# EAGLE library part BUFFER-CASTELLATION (library pixel)
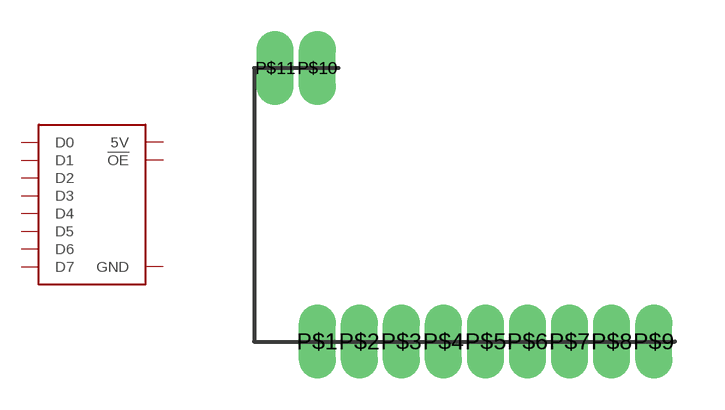
[diagram p2: symbol with the pads of BUFFER-CASTELLATION; footprint BUFFER-CASTELLATION]

Designator prefix -

## BUFFER-CASTELLATION  [BUFFER-CASTELLATION]
P$1  D0  in
P$2  D1  in
P$3  D2  in
P$4  D3  in
P$5  D4  in
P$6  D5  in
P$7  D6  in
P$8  D7  in
P$9  GND  in
P$10  !OE  in
P$11  5V  in

## Footprint BUFFER-CASTELLATION (pad centres in mm)
drill 0.61 pad 0.711 long: P$1 -4.445,-5.08; P$2 -3.175,-5.08; P$3 -1.905,-5.08; P$4 -0.635,-5.08; P$5 0.635,-5.08; P$6 1.905,-5.08; P$7 3.175,-5.08; P$8 4.445,-5.08; P$9 5.715,-5.08; P$10 -4.445,3.175; P$11 -5.715,3.175